# Altium schematic symbol library 0805CA101KAT2A.SchLib: 1 symbol
Pins are listed as number, name and electrical type; pins without a type are passive.

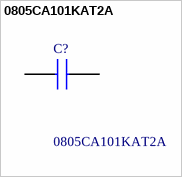
[diagram p0: symbol 0805CA101KAT2A]

## 0805CA101KAT2A
designator C?
100 pF +/-10% 1000V (1kV) Ceramic Capacitor C0G, NP0 0805 (2012 Metric); Manufacturer_Name: Kyocera AVX; Geometry.Height: 0.94mm; Mouser Part Number: 581-0805CA101KAT2A; Mouser Price/Stock: https://www.mouser.co.uk/ProductDetail/KYOCERA-AVX/0805CA101KAT2A?qs=ZBeOGGPQgEHtR%2FQeWT8jmQ%3D%3D; Manufacturer_Part_Number: 0805CA101KAT2A; Datasheet Link: https://datasheets.kyocera-avx.com/AVX-HV_MLCC.pdf
footprint CAPC2112X94N
pins: 1, 2